# Altium integrated library VIETTIEN.IntLib: 194 symbols (part 4 of 9)

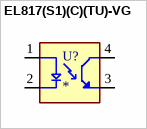
[diagram p69: symbol EL817(S1)(C)(TU)-VG]

## EL817(S1)(C)(TU)-VG
designator U?
Optoisolator Transistor Output 5000Vrms 1 Channel 4-SMD; MF: Everlight Electronics; MP: EL817(S1)(A)(TU)-VG; SnapEDA_Link: https://www.snapeda.com/parts/EL817(S1)(A)(TU)-VG/Everlight/view-part/?ref=snap; Package: NON STANDARD-4 Everlight; Value: *; Check_prices: https://www.snapeda.com/parts/EL817(S1)(A)(TU)-VG/Everlight/view-part/?ref=eda
footprint SOIC254P1030X390-4N_EL817(S1)(C)(TU)-VG
pins: 1 A, 2 C, 3 ET, 4 CT


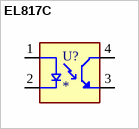
[diagram p70: symbol EL817C]

## EL817C
designator U?
Optoisolator Transistor Output 5000Vrms 1 Channel 4-DIP; MF: Everlight Electronics; MP: EL817C; SnapEDA_Link: https://www.snapeda.com/parts/EL817C/Everlight/view-part/?ref=snap; Package: 4-DIP Everlight Electronics; Value: *; Check_prices: https://www.snapeda.com/parts/EL817C/Everlight/view-part/?ref=eda
footprint DIP762W50P254L458H480Q4B
pins: 1 A, 2 C, 3 ET, 4 CT


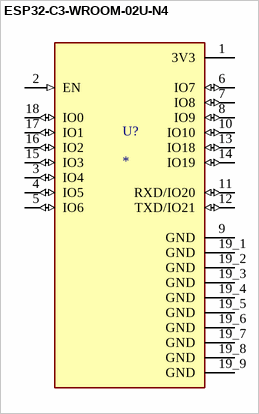
[diagram p71: symbol ESP32-C3-WROOM-02U-N4]

## ESP32-C3-WROOM-02U-N4
designator U?
Bluetooth, WiFi 802.11b/g/n, Bluetooth v5.0 Transceiver Module 2.4GHz Antenna Not Included, U.FL Surface Mount; MF: Espressif Systems; MP: ESP32-C3-WROOM-02U-N4; SnapEDA_Link: https://www.snapeda.com/parts/ESP32-C3-WROOM-02U-N4/Espressif+Systems/view-part/?ref=snap; Package: SMD-19 Espressif Systems; Value: *; Check_prices: https://www.snapeda.com/parts/ESP32-C3-WROOM-02U-N4/Espressif+Systems/view-part/?ref=eda
footprint XCVR_ESP32-C3-WROOM-02U-N4
pins: 1 3V3 (power), 2 EN (in), 3 IO4 (io), 4 IO5 (io), 5 IO6 (io), 6 IO7 (io), 7 IO8 (io), 8 IO9 (io), 9 GND (power), 10 IO10 (io), 11 RXD/IO20 (io), 12 TXD/IO21 (io), 13 IO18 (io), 14 IO19 (io), 15 IO3 (io), 16 IO2 (io), 17 IO1 (io), 18 IO0 (io), 19_1 GND (power), 19_2 GND (power), 19_3 GND (power), 19_4 GND (power), 19_5 GND (power), 19_6 GND (power), 19_7 GND (power), 19_8 GND (power), 19_9 GND (power)


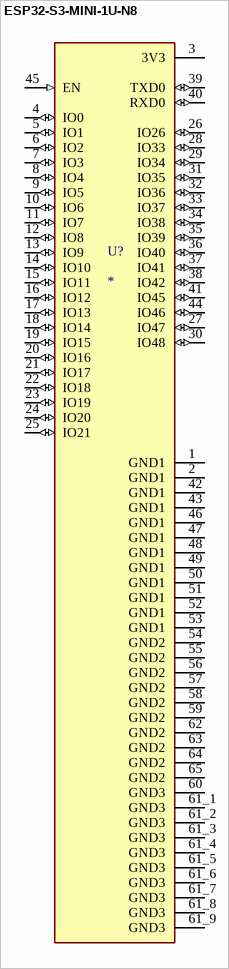
[diagram p72: symbol ESP32-S3-MINI-1U-N8]

## ESP32-S3-MINI-1U-N8
designator U?
Bluetooth, WiFi 802.11b/g/n, Bluetooth v5.0 Transceiver Module 2.4GHz Antenna Not Included, U.FL Surface Mount; MF: Espressif Systems; MP: ESP32-S3-MINI-1U-N8; SnapEDA_Link: https://www.snapeda.com/parts/ESP32-S3-MINI-1U-N8/Espressif+Systems/view-part/?ref=snap; Package: VFQFN-56 Espressif Systems; Value: *; Check_prices: https://www.snapeda.com/parts/ESP32-S3-MINI-1U-N8/Espressif+Systems/view-part/?ref=eda
footprint XCVR_ESP32-S3-MINI-1U-N8
pins: 1 GND1 (power), 2 GND1 (power), 3 3V3 (power), 4 IO0 (io), 5 IO1 (io), 6 IO2 (io), 7 IO3 (io), 8 IO4 (io), 9 IO5 (io), 10 IO6 (io), 11 IO7 (io), 12 IO8 (io), 13 IO9 (io), 14 IO10 (io), 15 IO11 (io), 16 IO12 (io), 17 IO13 (io), 18 IO14 (io), 19 IO15 (io), 20 IO16 (io), 21 IO17 (io), 22 IO18 (io), 23 IO19 (io), 24 IO20 (io), 25 IO21 (io), 26 IO26 (io), 27 IO47 (io), 28 IO33 (io), 29 IO34 (io), 30 IO48 (io), 31 IO35 (io), 32 IO36 (io), 33 IO37 (io), 34 IO38 (io), 35 IO39 (io), 36 IO40 (io), 37 IO41 (io), 38 IO42 (io), 39 TXD0 (io), 40 RXD0 (io), 41 IO45 (io), 42 GND1 (power), 43 GND1 (power), 44 IO46 (io), 45 EN (in), 46 GND1 (power), 47 GND1 (power), 48 GND1 (power), 49 GND1 (power), 50 GND1 (power), 51 GND1 (power), 52 GND1 (power), 53 GND1 (power), 54 GND2 (power), 55 GND2 (power), 56 GND2 (power), 57 GND2 (power), 58 GND2 (power), 59 GND2 (power), 60 GND3 (power), 61_1 GND3 (power), 61_2 GND3 (power), 61_3 GND3 (power), 61_4 GND3 (power), 61_5 GND3 (power), 61_6 GND3 (power), 61_7 GND3 (power), 61_8 GND3 (power), 61_9 GND3 (power), 62 GND2 (power), 63 GND2 (power), 64 GND2 (power), 65 GND2 (power)


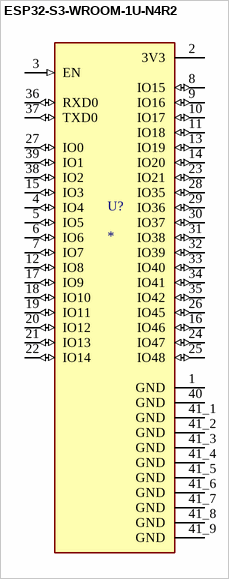
[diagram p73: symbol ESP32-S3-WROOM-1U-N4R2]

## ESP32-S3-WROOM-1U-N4R2
designator U?
MF: {'manufacturer': u'Espressif Systems'}; MP: ESP32-S3-WROOM-1U-N4R2; Package: None; Price: None; Value: *; Availability: Unavailable
footprint XCVR_ESP32-S3-WROOM-1U-N4R2
pins: 1 GND (power), 2 3V3 (power), 3 EN (in), 4 IO4 (io), 5 IO5 (io), 6 IO6 (io), 7 IO7 (io), 8 IO15 (io), 9 IO16 (io), 10 IO17 (io), 11 IO18 (io), 12 IO8 (io), 13 IO19 (io), 14 IO20 (io), 15 IO3 (io), 16 IO46 (io), 17 IO9 (io), 18 IO10 (io), 19 IO11 (io), 20 IO12 (io), 21 IO13 (io), 22 IO14 (io), 23 IO21 (io), 24 IO47 (io), 25 IO48 (io), 26 IO45 (io), 27 IO0 (io), 28 IO35 (io), 29 IO36 (io), 30 IO37 (io), 31 IO38 (io), 32 IO39 (io), 33 IO40 (io), 34 IO41 (io), 35 IO42 (io), 36 RXD0 (io), 37 TXD0 (io), 38 IO2 (io), 39 IO1 (io), 40 GND (power), 41_1 GND (power), 41_2 GND (power), 41_3 GND (power), 41_4 GND (power), 41_5 GND (power), 41_6 GND (power), 41_7 GND (power), 41_8 GND (power), 41_9 GND (power)


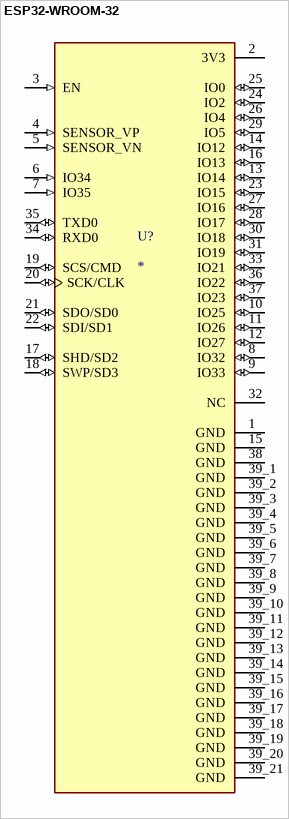
[diagram p74: symbol ESP32-WROOM-32]

## ESP32-WROOM-32
designator U?
Bluetooth, WiFi 802.11b/g/n, Bluetooth v4.2 +EDR, Class 1, 2 and 3 Transceiver Module 2.4GHz ~ 2.5GHz Antenna Not Included, U.FL Surface Mount; MP: ESP32-WROOM-32; MF: Espressif Systems; Price: None; Availability: In Stock; Package: Module Espressif Systems; SnapEDA_Link: https://www.snapeda.com/parts/ESP32-WROOM-32/Espressif+Systems/view-part/?ref=snap; Check_prices: https://www.snapeda.com/parts/ESP32-WROOM-32/Espressif+Systems/view-part/?ref=eda; Value: *; Purchase-URL: https://pricing.snapeda.com/search/part/ESP32-WROOM-32/?ref=eda
footprint MODULE_ESP32-WROOM-32
pins: 1 GND (power), 2 3V3 (power), 3 EN (in), 4 SENSOR_VP (in), 5 SENSOR_VN (in), 6 IO34 (in), 7 IO35 (in), 8 IO32 (io), 9 IO33 (io), 10 IO25 (io), 11 IO26 (io), 12 IO27 (io), 13 IO14 (io), 14 IO12 (io), 15 GND (power), 16 IO13 (io), 17 SHD/SD2 (io), 18 SWP/SD3 (io), 19 SCS/CMD (io), 20 SCK/CLK (io), 21 SDO/SD0 (io), 22 SDI/SD1 (io), 23 IO15 (io), 24 IO2 (io), 25 IO0 (io), 26 IO4 (io), 27 IO16 (io), 28 IO17 (io), 29 IO5 (io), 30 IO18 (io), 31 IO19 (io), 32 NC, 33 IO21 (io), 34 RXD0 (io), 35 TXD0 (io), 36 IO22 (io), 37 IO23 (io), 38 GND (power), 39_1 GND (power), 39_2 GND (power), 39_3 GND (power), 39_4 GND (power), 39_5 GND (power), 39_6 GND (power), 39_7 GND (power), 39_8 GND (power), 39_9 GND (power), 39_10 GND (power), 39_11 GND (power), 39_12 GND (power), 39_13 GND (power), 39_14 GND (power), 39_15 GND (power), 39_16 GND (power), 39_17 GND (power), 39_18 GND (power), 39_19 GND (power), 39_20 GND (power), 39_21 GND (power)


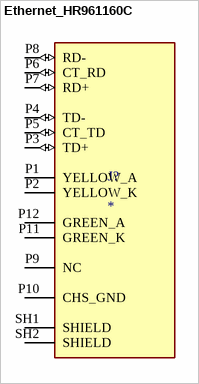
[diagram p75: symbol Ethernet_HR961160C]

## Ethernet_HR961160C
designator J?
1x1 Port Tab-UP Surface Mount RJ45 Connector with Magnetics Module and LEDfor 10/100Base-TX NIC Applications.; MF: HanRun; MP: HR961160C; SnapEDA_Link: https://www.snapeda.com/parts/HR961160C/HanRun/view-part/?ref=snap; Package: Package; Value: *; Check_prices: https://www.snapeda.com/parts/HR961160C/HanRun/view-part/?ref=eda
footprint HANRUN_HR961160C
pins: P1 YELLOW_A, P2 YELLOW_K, P3 TD+ (io), P4 TD- (io), P5 CT_TD (io), P6 CT_RD (io), P7 RD+ (io), P8 RD- (io), P9 NC, P10 CHS_GND (power), P11 GREEN_K, P12 GREEN_A, SH1 SHIELD, SH2 SHIELD


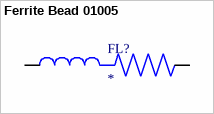
[diagram p76: symbol Ferrite Bead 01005]

## Ferrite Bead 01005
designator FL?
Ferrite Bead 01005; MP: BLF02JD361GNED; MF: Murata; Purchase-URL: https://pricing.snapeda.com/search/part/BLF02JD361GNED/?ref=eda; Package: 0402 Murata; SnapEDA_Link: https://www.snapeda.com/parts/BLF02JD361GNED/Murata/view-part/4302576/?ref=snap; Value: *; Availability: Good; Price: None; Check_prices: https://www.snapeda.com/parts/BLF02JD361GNED/Murata/view-part/4302576/?ref=eda
footprint BEADC0402X32N
pins: 1, 2


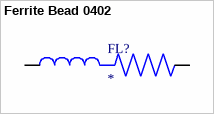
[diagram p77: symbol Ferrite Bead 0402]

## Ferrite Bead 0402
designator FL?
Ferrite Bead 0402; MF: Murata; MP: NFZ15SG151SN11D; SnapEDA_Link: https://www.snapeda.com/parts/NFZ15SG151SN11D/Murata/view-part/?ref=snap; Package: 1005 Taiyo Yuden; Value: *; Check_prices: https://www.snapeda.com/parts/NFZ15SG151SN11D/Murata/view-part/?ref=eda
footprint BEADC1005X55N
pins: 1, 2


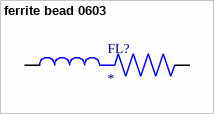
[diagram p78: symbol ferrite bead 0603]

## ferrite bead 0603
designator FL?
ferrite bead 0603; MP: BLM18BD421SZ1D; Package: None; Price: None; Value: *; Availability: Unavailable
footprint BEADC1608X95N
pins: 1, 2


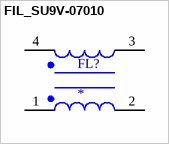
[diagram p79: symbol FIL_SU9V-07010]

## FIL_SU9V-07010
designator FL?
1 mH @ 1 kHz 2 Line Common Mode Choke Through Hole 700mA DCR 600mOhm; MF: Kemet; MP: SU9V-07010; SnapEDA_Link: https://www.snapeda.com/parts/SU9V-07010/Kemet/view-part/?ref=snap; Package: Vertical-4 Kemet; Value: *; Check_prices: https://www.snapeda.com/parts/SU9V-07010/Kemet/view-part/?ref=eda
footprint FIL_SU9V-07010
pins: 1, 2, 3, 4


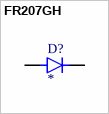
[diagram p80: symbol FR207GH]

## FR207GH
designator D?
500ns, 2A, 1000V, Fast Recovery Rectifier; MF: Taiwan Semiconductor Corporation; MP: FR207GH; SnapEDA_Link: https://www.snapeda.com/parts/FR207GH/Taiwan+Semiconductor/view-part/?ref=snap; Package: DO-15 Taiwan Semiconductor; Value: *; Check_prices: https://www.snapeda.com/parts/FR207GH/Taiwan+Semiconductor/view-part/?ref=eda
footprint DIOAD1300W80L670D310
pins: A, C K


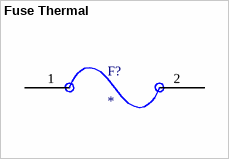
[diagram p81: symbol Fuse Thermal]

## Fuse Thermal
designator F?
Fuse, Resettable, Fast Acting, 10A, Sz 1206, 0.134x0.071x0.033", SMT, 24VDC, PCB | Bourns MF-NSMF200-2
footprint Fuse_thermal
pins: 1, 2


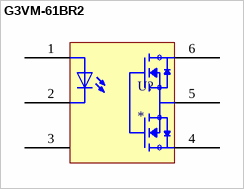
[diagram p82: symbol G3VM-61BR2]

## G3VM-61BR2
designator U?
MOS FET Relay, SS, G3VM Series, SPST-NO, 4A, 60V, DIP 6-Pin, PCB Terminals | Omron Electronic Components G3VM-61BR2
footprint G3VM-61BR2
pins: 1, 2, 3, 4, 5, 6


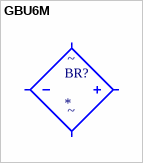
[diagram p83: symbol GBU6M]

## GBU6M
designator BR?
Bridge Rectifier Single Phase Standard 1 kV Through Hole GBU; MF: ON Semiconductor; MP: GBU6M; SnapEDA_Link: https://www.snapeda.com/parts/GBU6M/Onsemi/view-part/?ref=snap; Package: SIP-4 ON Semiconductor; Value: *; Check_prices: https://www.snapeda.com/parts/GBU6M/Onsemi/view-part/?ref=eda
footprint GBU_4L
pins: 1 (io), 2 (io), 3 (io), 4 (io)
text: ~


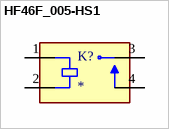
[diagram p84: symbol HF46F_005-HS1]

## HF46F_005-HS1
designator K?
Relay: electromagnetic; SPST-NO; Ucoil: 5VDC; 5A/250VAC; 5A/30VDC; MF: Hongfa; MP: HF46F/005-HS1; SnapEDA_Link: https://www.snapeda.com/parts/HF46F/005-HS1/Hongfa/view-part/?ref=snap; Package: None; Value: *; Check_prices: https://www.snapeda.com/parts/HF46F/005-HS1/Hongfa/view-part/?ref=eda
footprint RELAY_HF46F_005-HS1
pins: 1 COIL1, 2 COIL2, 3 COM, 4 NO


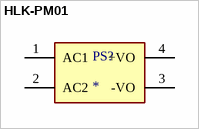
[diagram p85: symbol HLK-PM01]

## HLK-PM01
designator PS?
The HLK-PM01 is a small size low cost AC to DC converter which can take in 110V/220V AC at 50/60 Hz and give 5V 3W output. The module is can be used in designs which run on 5V and needs to be powered form the AC mains.; MF: Hi-link; SnapEDA_Link: https://www.snapeda.com/parts/hlk-pm01/Hi-link/view-part/?ref=snap; Package: None; Value: *; MP: hlk-pm01; Check_prices: https://www.snapeda.com/parts/hlk-pm01/Hi-link/view-part/?ref=eda
footprint CONV_HLK-PM01
pins: 1 AC1, 2 AC2, 3 -VO, 4 +VO


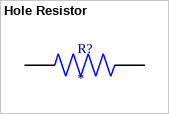
[diagram p86: symbol Hole Resistor]

## Hole Resistor
designator R?
X kOhms Â±1% 0.25W, 1/4W Through Hole Resistor Axial - Metal Film; MF: Yageo; MP: MFR-25FBF52-10K; SnapEDA_Link: https://www.snapeda.com/parts/MFR-25FBF52-10K/Yageo/view-part/?ref=snap; Package: RADIAL-2 YAGEO; Value: *; Check_prices: https://www.snapeda.com/parts/MFR-25FBF52-10K/Yageo/view-part/?ref=eda
footprint RESAD1100W55L680D260
pins: 1, 2


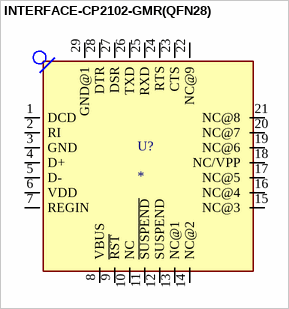
[diagram p87: symbol INTERFACE-CP2102-GMR(QFN28)]

## INTERFACE-CP2102-GMR(QFN28)
designator U?
USB Bridge, USB to UART USB 2.0 UART Interface 28-QFN (5x5); MP: CP2102-GMR; MF: Silicon; Price: None; Availability: In Stock; Package: VFQFN-28 Vishay Siliconix; SnapEDA_Link: https://www.snapeda.com/parts/CP2102-GMR/Silicon+Labs/view-part/?ref=snap; Check_prices: https://www.snapeda.com/parts/CP2102-GMR/Silicon+Labs/view-part/?ref=eda; Value: *; Purchase-URL: https://pricing.snapeda.com/search/part/CP2102-GMR/?ref=eda
footprint QFN28G_0.5-5X5MM
pins: 1 DCD (io), 2 RI (io), 3 GND (io), 4 D+ (io), 5 D- (io), 6 VDD (io), 7 REGIN (io), 8 VBUS (io), 9 ~{RST} (io), 10 NC (io), 11 ~{SUSPEND} (io), 12 SUSPEND (io), 13 NC@1 (io), 14 NC@2 (io), 15 NC@3 (io), 16 NC@4 (io), 17 NC@5 (io), 18 NC/VPP (io), 19 NC@6 (io), 20 NC@7 (io), 21 NC@8 (io), 22 NC@9 (io), 23 CTS (io), 24 RTS (io), 25 RXD (io), 26 TXD (io), 27 DSR (io), 28 DTR (io), 29 GND@1 (io)


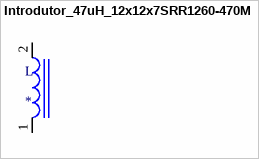
[diagram p88: symbol Introdutor_47uH_12x12x7SRR1260-470M]

## Introdutor_47uH_12x12x7SRR1260-470M
designator L
47ÂµH Shielded Wirewound Inductor 2.6A 86mOhm Max Nonstandard; MP: SRR1260-470M; MF: Bourns; Value: *; Package: Nonstandard Bourns; Price: None; SnapEDA_Link: https://www.snapeda.com/parts/SRR1260-470M/Bourns/view-part/283129/?ref=snap; Availability: Unavailable
footprint Introdutor_47uH_12x12x7
pins: 1, 2


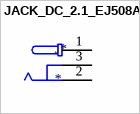
[diagram p89: symbol JACK_DC_2.1_EJ508A]

## JACK_DC_2.1_EJ508A
designator J*
Power Barrel Connector Jack 2.10mm ID _0.083_, 5.50mm OD _0.217_ Through Hole, Right Angle / EJ508A; MF: MPD; Package: Non-Standard MPD; Value: *; SnapEDA_Link: https://www.snapeda.com/parts/EJ508A/MPD%20%28Memory%20Protection%20Devices%29/view-part/474399/?ref=snap; Price: None; MP: EJ508A; Availability: Unavailable
footprint MPD_EJ508A
pins: 1, 2, 3


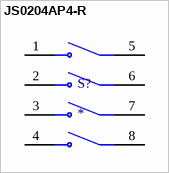
[diagram p90: symbol JS0204AP4-R]

## JS0204AP4-R
designator S?
Công Tắc DIP Switch Dán SMD 4 Bit 2.54mm; MP: JS0204AP4-R; Package: None; Price: None; Value: *; Availability: Unavailable
footprint SW_JS0204AP4-R
pins: 1, 2, 3, 4, 5, 6, 7, 8


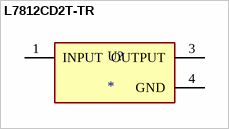
[diagram p91: symbol L7812CD2T-TR]

## L7812CD2T-TR
designator U?
Linear Voltage Regulator IC Positive Fixed 1 Output 1.5A D2PAK; MF: STMicroelectronics; MP: L7812CD2T-TR; SnapEDA_Link: https://www.snapeda.com/parts/L7812CD2T-TR/STMicroelectronics/view-part/?ref=snap; Package: TO-263-3 STMicroelectronics; Value: *; Check_prices: https://www.snapeda.com/parts/L7812CD2T-TR/STMicroelectronics/view-part/?ref=eda
footprint VREG_L7812CD2T-TR
pins: 1 INPUT, 3 OUTPUT, 4 GND (power)
